# Altium footprint library Inductor.PcbLib: 58 footprints (part 3 of 4)
Each footprint in its own frame and in the unit in brackets; x right, y up, seen from the top. Pads: shape width x height; smd on the part's side, far side on the other; paste and mask are expansions set on the pad; w line width, h text height; cw(c..) or ccw(c..) is an arc to the next point about the centre after c.
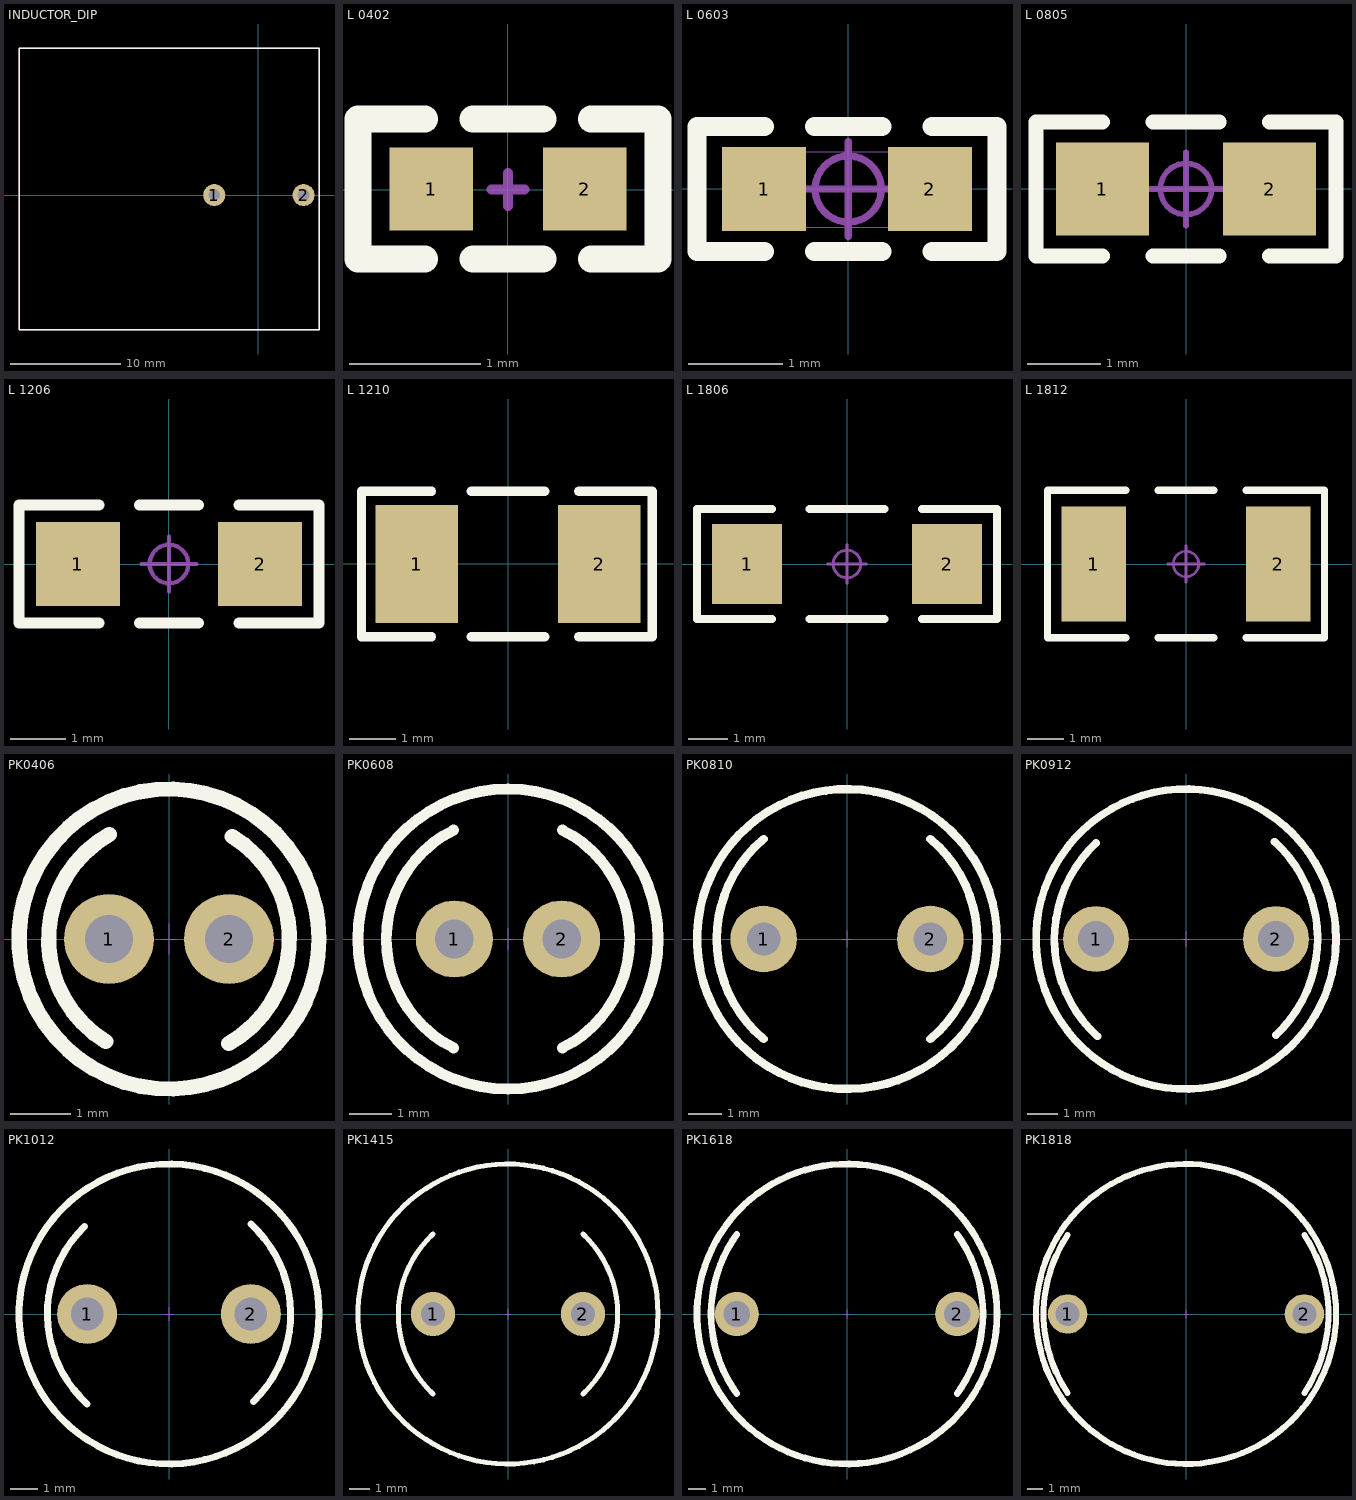
[diagram p2: the footprints below, top view; thin cyan lines are the x and y axes]

## INDUCTOR_DIP [mm]
pads (2):
  round 2 hole 1.06: 1(-4,0) 2(4.1,0)
Top Overlay:
  lines w0.127: -21.7,-12.2 -21.7,13.3 5.5,13.3 5.5,-12.2 -21.7,-12.2
Mechanical 13:
  lines w0.127: -21.7,-12.2 -21.7,13.3 5.5,13.3 5.5,-12.2 -21.7,-12.2
3D body "Toroidal Inductor concept SMD version.stp": height 12.67, standoff 0, extent -21.66,-12.26 9.273,13.26

## L 0402 [mm]
pads (2):
  rect 0.635x0.635 smd: 1(-0.584,0.004) 2(0.584,0.004)
Top Overlay:
  lines w0.203: -0.635,-0.529 -1.143,-0.529 -1.143,0.537 -0.635,0.537 ; -0.267,-0.529 0.267,-0.529 ; -0.267,0.537 0.267,0.537 ; 0.635,-0.529 1.143,-0.529 1.143,0.537 0.635,0.537
Top Designator:
  text ".Designator" at -3.71,-0.34 h1.52
Mechanical 15:
  lines w0.076: -0.127,0 0.127,0 -0.127,0 ; 0,-0.127 0,0.127 0,-0.127
3D body "0402.STEP": height 0.5, standoff 0, extent -0.5,-0.25 0.5,0.25

## L 0603 [mil]
pads (2):
  rect 35x35 smd: 1(-35,0) 2(34,0)
Top Overlay:
  lines w8: -35,-26 -63,-26 -63,26 -35,26 ; -14,-26 14,-26 ; -14,26 14,26 ; 35,-26 62,-26 62,26 35,26
Top Designator:
  text ".Designator" at -146.58,-13.55 h60
Mechanical 13:
  lines w0.39: -31.5,-16 31.49,-16 31.49,15.49 -31.5,15.49 -31.5,-16
Mechanical 15:
  circle w3: c0,0 r13.78
  lines w3: -19.69,0 19.68,0 ; 0,-19.69 0,19.68
3D body "0603.STEP": height 31.5, standoff -0.11, extent -31.5,-15.75 31.5,15.75

## L 0805 [mm]
pads (2):
  rect 1.27x1.27 smd: 1(-1.143,0) 2(1.143,0)
Top Overlay:
  lines w0.203: -1.143,-0.914 -2.05,-0.914 -2.05,0.914 -1.143,0.914 ; -0.454,-0.914 0.454,-0.914 ; -0.454,0.914 0.454,0.914 ; 1.143,-0.914 2.05,-0.914 2.05,0.914 1.143,0.914
Top Designator:
  text ".Designator" at -3.71,-0.344 h1.52
Mechanical 15:
  circle w0.076: c0,0 r0.35
  lines w0.076: -0.5,0 0.5,0 ; 0,-0.5 0,0.5
3D body "0805.STEP": height 0.9, standoff 0, extent -1,-0.6 1,0.6

## L 1206 [mil]
pads (2):
  rect 60x60 smd: 1(-65,0) 2(65,0)
Top Overlay:
  lines w8: -50,-42 -107,-42 -107,42 -50,42 ; -21,-42 21,-42 ; -21,42 21,42 ; 50,-42 107,-42 107,42 50,42
Top Designator:
  text ".Designator" at -146.07,-13.54 h60
Mechanical 15:
  circle w3: c0,0 r13.78
  lines w3: -19.68,0 19.68,0 ; 0,-19.68 0,19.68
3D body "1206.STEP": height 35.43, standoff -0.19, extent -62.99,-31.5 62.99,31.49

## L 1210 [mil]
pads (2):
  rect 70x100 smd: 1(-77.5,0) 2(77.5,0)
Top Overlay:
  lines w8: -65,-62 -124.5,-62 -124.5,62 -65,62 ; -31.25,-62 31.25,-62 ; -31.25,62 31.25,62 ; 60,-62 122.5,-62 122.5,62 60,62
Top Designator:
  text ".Designator" at -147.08,-13.55 h60
3D body "1210.STEP": height 51.18, standoff -0.19, extent -62.99,-49.21 62.99,49.21

## L 1806 [mil]
pads (2):
  rect 70x80 smd: 1(-100,0) 2(100,0)
Top Overlay:
  lines w8: -75,-55 -150,-55 -150,55 -75,55 ; -37.5,-55 37.5,-55 ; -37.5,55 37.5,55 ; 75,-55 150,-55 150,55 75,55
Top Designator:
  text ".Designator" at -146.08,-13.54 h60
Mechanical 15:
  circle w3: c0,0 r13.78
  lines w3: -19.68,0 19.68,0 ; 0,-19.68 0,19.68
3D body "1806.STEP": height 62.99, standoff -0.19, extent -88.58,-31.5 88.58,31.5

## L 1812 [mil]
pads (2):
  rect 70x125 smd: 1(-100,0) 2(100,0)
Top Overlay:
  lines w8: -65,-80 -150,-80 -150,80 -65,80 ; -30,-80 30,-80 ; -30,80 30,80 ; 65,-80 150,-80 150,80 65,80
Top Designator:
  text ".Designator" at -146.08,-13.54 h60
Mechanical 15:
  circle w3: c0,0 r13.78
  lines w3: -19.68,0 19.68,0 ; 0,-19.68 0,19.68
3D body "1812.STEP": height 59.06, standoff -0.19, extent -88.58,-62.99 88.58,62.99

## PK0406 [mm] "2*5*8mm"
pads (2):
  round 1.5 hole 0.8: 1(-1,0) 2(1,0)
Top Overlay:
  circle w0.254: c0,0 r2.5
  lines w0.254: -1.052,-1.71 cw(c0,0) -0.996,1.743 ; 0.996,-1.743 ccw(c0,0) 1.052,1.71
Top Designator:
  text ".Designator" at -3.71,-0.344 h1.52
Mechanical 15:
  lines w0.01: -0.127,0 0.127,0 ; 0,-0.254 0,0.254
3D body "PK0406.STEP": height 8.02, standoff -2.78, extent -2.5,-2.5 2.5,2.5

## PK0608 [mm] "2.5*7*10mm"
pads (2):
  round 1.8 hole 0.9: 1(-1.25,0) 2(1.25,0)
Top Overlay:
  circle w0.254: c0,0 r3.5
  lines w0.254: -1.27,-2.54 cw(c0,0) -1.27,2.54 ; 1.27,-2.54 ccw(c0,0) 1.27,2.54
Top Designator:
  text ".Designator" at -3.71,-0.344 h1.52
Mechanical 15:
  lines w0.01: -0.127,0 0.127,0 ; 0,-0.254 0,0.254
3D body "PK0608.STEP": height 10.02, standoff -2.78, extent -3.5,-3.488 3.5,3.488

## PK0810 [mm] "5*9*12mm"
pads (2):
  round 2 hole 1: 1(-2.5,0) 2(2.5,0)
Top Overlay:
  circle w0.254: c0,0 r4.5
  lines w0.254: -2.5,-3 cw(c0,0) -2.5,3 ; 2.5,-3 ccw(c0,0) 2.5,3
Top Designator:
  text ".Designator" at -3.71,-0.344 h1.52
Mechanical 15:
  lines w0.01: -0.127,0 0.127,0 ; 0,-0.254 0,0.254
3D body "PK0810.STEP": height 12.02, standoff -2.78, extent -4.5,-4.5 4.5,4.5

## PK0912 [mm] "6*10*14mm"
pads (2):
  round 2.2 hole 1.2: 1(-3,0) 2(3,0)
Top Overlay:
  circle w0.254: c0,0 r5
  lines w0.254: -3,3.2 ccw(c0,0) -2.951,-3.246 ; 2.951,3.246 cw(c0,0) 3,-3.2
Top Designator:
  text ".Designator" at -3.71,-0.344 h1.52
Mechanical 15:
  lines w0.01: -0.127,0 0.127,0 ; 0,-0.254 0,0.254
3D body "PK0912.STEP": height 14.02, standoff -2.78, extent -5,-4.994 5,4.994

## PK1012 [mm] "6*11*14mm"
pads (2):
  round 2.2 hole 1.2: 1(-3,0) 2(3,0)
Top Overlay:
  circle w0.254: c0,0 r5.5
  lines w0.254: -3.101,3.205 ccw(c0,0) -3,-3.3 ; 3,3.3 cw(c0,0) 3.101,-3.205
Top Designator:
  text ".Designator" at -3.71,-0.344 h1.52
Mechanical 15:
  lines w0.01: -0.127,0 0.127,0 ; 0,-0.254 0,0.254
3D body "PK1012.STEP": height 14.02, standoff -2.78, extent -5.5,-5.5 5.5,5.5

## PK1415 [mm] "7.5*15*17mm"
pads (2):
  round 2.2 hole 1.2: 1(-3.75,0) 2(3.75,0)
Top Overlay:
  circle w0.254: c0,0 r7.5
  lines w0.254: -3.75,-4 cw(c0,0) -3.75,4 ; 3.75,-4 ccw(c0,0) 3.75,4
Top Designator:
  text ".Designator" at -3.71,-0.344 h1.52
Mechanical 15:
  lines w0.01: -0.127,0 0.127,0 ; 0,-0.254 0,0.254
3D body "PK1415.STEP": height 17.02, standoff -2.78, extent -7.5,-7.5 7.5,7.5

## PK1618 [mm] "12.5*17*20mm"
pads (2):
  round 2.5 hole 1.5: 1(-6.25,0) 2(6.25,0)
Top Overlay:
  circle w0.381: c0,0 r8.5
  lines w0.381: -6.25,-4.5 cw(c0,0) -6.25,4.5 ; 6.25,-4.5 ccw(c0,0) 6.25,4.5
Top Designator:
  text ".Designator" at -3.71,-0.344 h1.52
Mechanical 15:
  lines w0.01: -0.127,0 0.127,0 ; 0,-0.254 0,0.254
3D body "PK1618.STEP": height 20.02, standoff -2.78, extent -8.5,-8.488 8.5,8.488

## PK1818 [mm] "15*19*20mm"
pads (2):
  round 2.5 hole 1.5: 1(-7.5,0) 2(7.5,0)
Top Overlay:
  circle w0.381: c0,0 r9.5
  lines w0.381: -7.5,-5 cw(c0,0) -7.5,5 ; 7.5,-5 ccw(c0,0) 7.5,5
Top Designator:
  text ".Designator" at -3.71,-0.344 h1.52
Mechanical 15:
  lines w0.01: -0.127,0 0.127,0 ; 0,-0.254 0,0.254
3D body "PK1818.STEP": height 20.02, standoff -2.78, extent -9.5,-9.488 9.5,9.488